# Altium schematic symbol library Schlib1.SchLib: 25 symbols
Pins are listed as number, name and electrical type; pins without a type are passive.

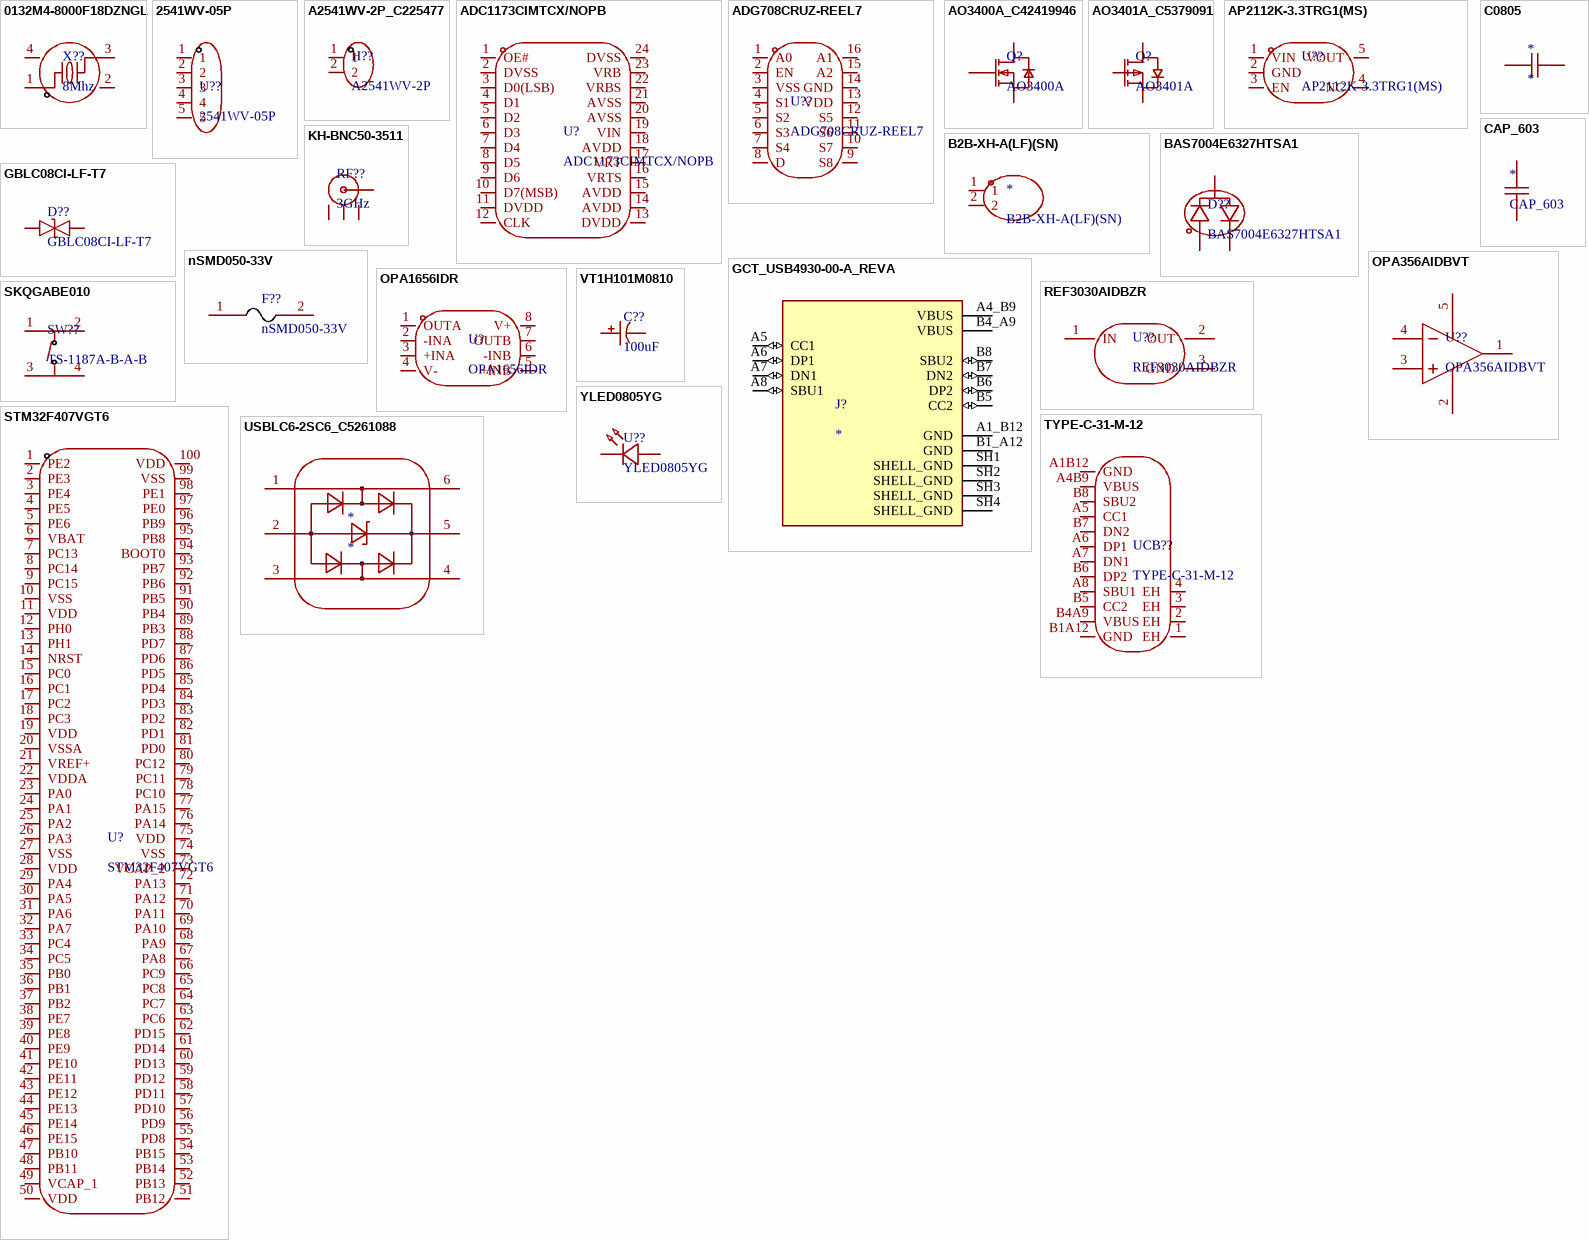
[diagram p0: symbols 0132M4-8000F18DZNGL to YLED0805YG]

## 0132M4-8000F18DZNGL
designator X??, comment 8Mhz
footprint CRYSTAL-SMD_4P-L3.2-W2.5-BL
pins: 1, 2 GND, 3, 4 GND

## 2541WV-05P
designator U??
5-pin single-row male pin header, 2.54 mm pitch, through-hole, straight.
footprint HDR-TH_5P-P2.54-V-M
pins: 1, 2, 3, 4, 5

## A2541WV-2P_C225477
designator H??, comment A2541WV-2P
2-pin male pin header, 2.54 mm pitch, single-row, straight through-hole, 3 A, 250 V.
footprint HDR-TH_P2.54-H-M_A2541WV-2P
pins: 1, 2

## ADC1173CIMTCX/NOPB
designator U?
8-bit, 15 MSPS single-channel ADC, 3 V supply
footprint TSSOP-24
pins: 1 OE#, 2 DVSS, 3 D0(LSB), 4 D1, 5 D2, 6 D3, 7 D4, 8 D5, 9 D6, 10 D7(MSB), 11 DVDD, 12 CLK, 13 DVDD, 14 AVDD, 15 AVDD, 16 VRTS, 17 VRT, 18 AVDD, 19 VIN, 20 AVSS, 21 AVSS, 22 VRBS, 23 VRB, 24 DVSS

## ADG708CRUZ-REEL7
designator U??
8:1 low-voltage analog multiplexer/switch, 4.5 Ω max RON, 55 MHz bandwidth
footprint TSSOP-16
pins: 1 A0, 2 EN, 3 VSS, 4 S1, 5 S2, 6 S3, 7 S4, 8 D, 9 S8, 10 S7, 11 S6, 12 S5, 13 VDD, 14 GND, 15 A2, 16 A1

## AO3400A_C42419946
designator Q?, comment AO3400A
N-channel MOSFET, 30 V, 5.7 A, low RDS(on)
footprint SOT-23-3_L2.9-W1.3-P1.90-LS2.4-BR
pins: 1 G, 2 S, 3 D

## AO3401A_C5379091
designator Q?, comment AO3401A
P-channel MOSFET, −30 V, −4 A, low RDS(on)
footprint SOT-23-3_L2.9-W1.6-P1.90-LS2.8-BR
pins: 1 G, 2 S, 3 D

## AP2112K-3.3TRG1(MS)
designator U??
3.3 V, 600 mA fixed-output LDO regulator with enable
footprint SOT-23-5_L2.9-W1.6-P0.95-LS2.7-BR
pins: 1 VIN, 2 GND, 3 EN, 4 NC, 5 VOUT

## B2B-XH-A(LF)(SN)
designator *
2-pin JST XH series wire-to-board header, 2.5 mm pitch, straight through-hole, 3 A, 250 V
footprint B2B-XH-A(LF)(SN)
pins: 1, 2

## BAS7004E6327HTSA1
designator D??
Dual Schottky diode, 70 V, 70 mA, SOT-23 package.
footprint SOT-23-3
pins: 1, 2, 3

## C0805
designator *
footprint 0805
pins: 1, 2

## CAP_603
designator *
footprint 0603
pins: 1, 2

## GBLC08CI-LF-T7
designator D??
Bidirectional TVS/ESD protection diode, 8 V standoff, 13.4 V clamping, 0.6 pF capacitance
footprint SOD-323_L1.8-W1.3-LS2.5-BI
pins: 1 K, 2 A

## GCT_USB4930-00-A_REVA
designator J?
Type C USB 2.0 Connector
footprint GCT_USB4930-00-A_REVA
pins: A1_B12 GND (power), A4_B9 VBUS (power), A5 CC1 (io), A6 DP1 (io), A7 DN1 (io), A8 SBU1 (io), B1_A12 GND (power), B4_A9 VBUS (power), B5 CC2 (io), B6 DP2 (io), B7 DN2 (io), B8 SBU2 (io), SH1 SHELL_GND (power), SH2 SHELL_GND (power), SH3 SHELL_GND (power), SH4 SHELL_GND (power)

## KH-BNC50-3511
designator RF??, comment 3GHz
50 Ω right-angle BNC PCB connector, through-hole, DC–3 GHz, 9.5 mm interface
footprint ANT-TH_KH-BNC50-3511
pins: 1 OUT, 2, 3, 4

## nSMD050-33V
designator F??
Resettable PTC fuse, 0.5 A hold current, 33 V max
footprint 1206
pins: 1, 2

## OPA356AIDBVT
designator U??
High-speed CMOS single operational amplifier, 200 MHz GBW, rail-to-rail output
footprint SOT-23-5
pins: 1 OUT, 2 V-, 3 IN+, 4 IN-, 5 V+

## OPA1656IDR
designator U?
Dual FET-input audio op-amp, 2.9nV/√Hz, 53MHz GBW, SOIC-8
footprint SOIC-8
pins: 1 OUTA, 2 -INA, 3 +INA, 4 V-, 5 +INB, 6 -INB, 7 OUTB, 8 V+

## REF3030AIDBZR
designator U??
3.0 V precision voltage reference, ±0.2% accuracy, 25 mA output
footprint SOT-23-3_L2.9-W1.6-P1.90-LS2.8-BR_2
pins: 1 IN, 2 OUT, 3 GND

## SKQGABE010
designator SW??, comment TS-1187A-B-A-B
SMD tactile pushbutton switch, SPST-NO, 12 V, 50 mA, 5.1 × 5.1 × 1.5 mm.
footprint SKQGABE010
pins: 1 A, 2 B, 3 C, 4 D

## STM32F407VGT6
designator U?
footprint LQFP-100_L14.0-W14.0-P0.50-LS16.0-BL
pins: 1 PE2, 2 PE3, 3 PE4, 4 PE5, 5 PE6, 6 VBAT, 7 PC13, 8 PC14, 9 PC15, 10 VSS, 11 VDD, 12 PH0, 13 PH1, 14 NRST, 15 PC0, 16 PC1, 17 PC2, 18 PC3, 19 VDD, 20 VSSA, 21 VREF+, 22 VDDA, 23 PA0, 24 PA1, 25 PA2, 26 PA3, 27 VSS, 28 VDD, 29 PA4, 30 PA5, 31 PA6, 32 PA7, 33 PC4, 34 PC5, 35 PB0, 36 PB1, 37 PB2, 38 PE7, 39 PE8, 40 PE9, 41 PE10, 42 PE11, 43 PE12, 44 PE13, 45 PE14, 46 PE15, 47 PB10, 48 PB11, 49 VCAP_1, 50 VDD, 51 PB12, 52 PB13, 53 PB14, 54 PB15, 55 PD8, 56 PD9, 57 PD10, 58 PD11, 59 PD12, 60 PD13, 61 PD14, 62 PD15, 63 PC6, 64 PC7, 65 PC8, 66 PC9, 67 PA8, 68 PA9, 69 PA10, 70 PA11, 71 PA12, 72 PA13, 73 VCAP_2, 74 VSS, 75 VDD, 76 PA14, 77 PA15, 78 PC10, 79 PC11, 80 PC12, 81 PD0, 82 PD1, 83 PD2, 84 PD3, 85 PD4, 86 PD5, 87 PD6, 88 PD7, 89 PB3, 90 PB4, 91 PB5, 92 PB6, 93 PB7, 94 BOOT0, 95 PB8, 96 PB9, 97 PE0, 98 PE1, 99 VSS, 100 VDD

## TYPE-C-31-M-12
designator UCB??
footprint USB-C_SMD-TYPE-C-31-M-12_1
pins: 1 EH, 2 EH, 3 EH, 4 EH, A1B12 GND, A4B9 VBUS, A5 CC1, A6 DP1, A7 DN1, A8 SBU1, B1A12 GND, B4A9 VBUS, B5 CC2, B6 DP2, B7 DN2, B8 SBU2

## USBLC6-2SC6_C5261088
designator *
footprint SOT-23-6_L2.9-W1.6-P0.95-LS2.8-BR
pins: 1, 2, 3, 4, 5, 6

## VT1H101M0810
designator C??, comment 100uF
100 µF, 50 V aluminum electrolytic capacitor, ±20%, SMD, 8 × 10.2 mm, 105°C
footprint CAP-SMD_BD8.0-L8.3-W8.3-FD
pins: 1, 2

## YLED0805YG
designator U??
pins: 1, 2